# Altium footprint library Library_PCB.PcbLib: 19 footprints (part 1 of 2)
Each footprint in its own frame and in the unit in brackets; x right, y up, seen from the top. Pads: shape width x height; smd on the part's side, far side on the other; paste and mask are expansions set on the pad; w line width, h text height; cw(c..) or ccw(c..) is an arc to the next point about the centre after c.
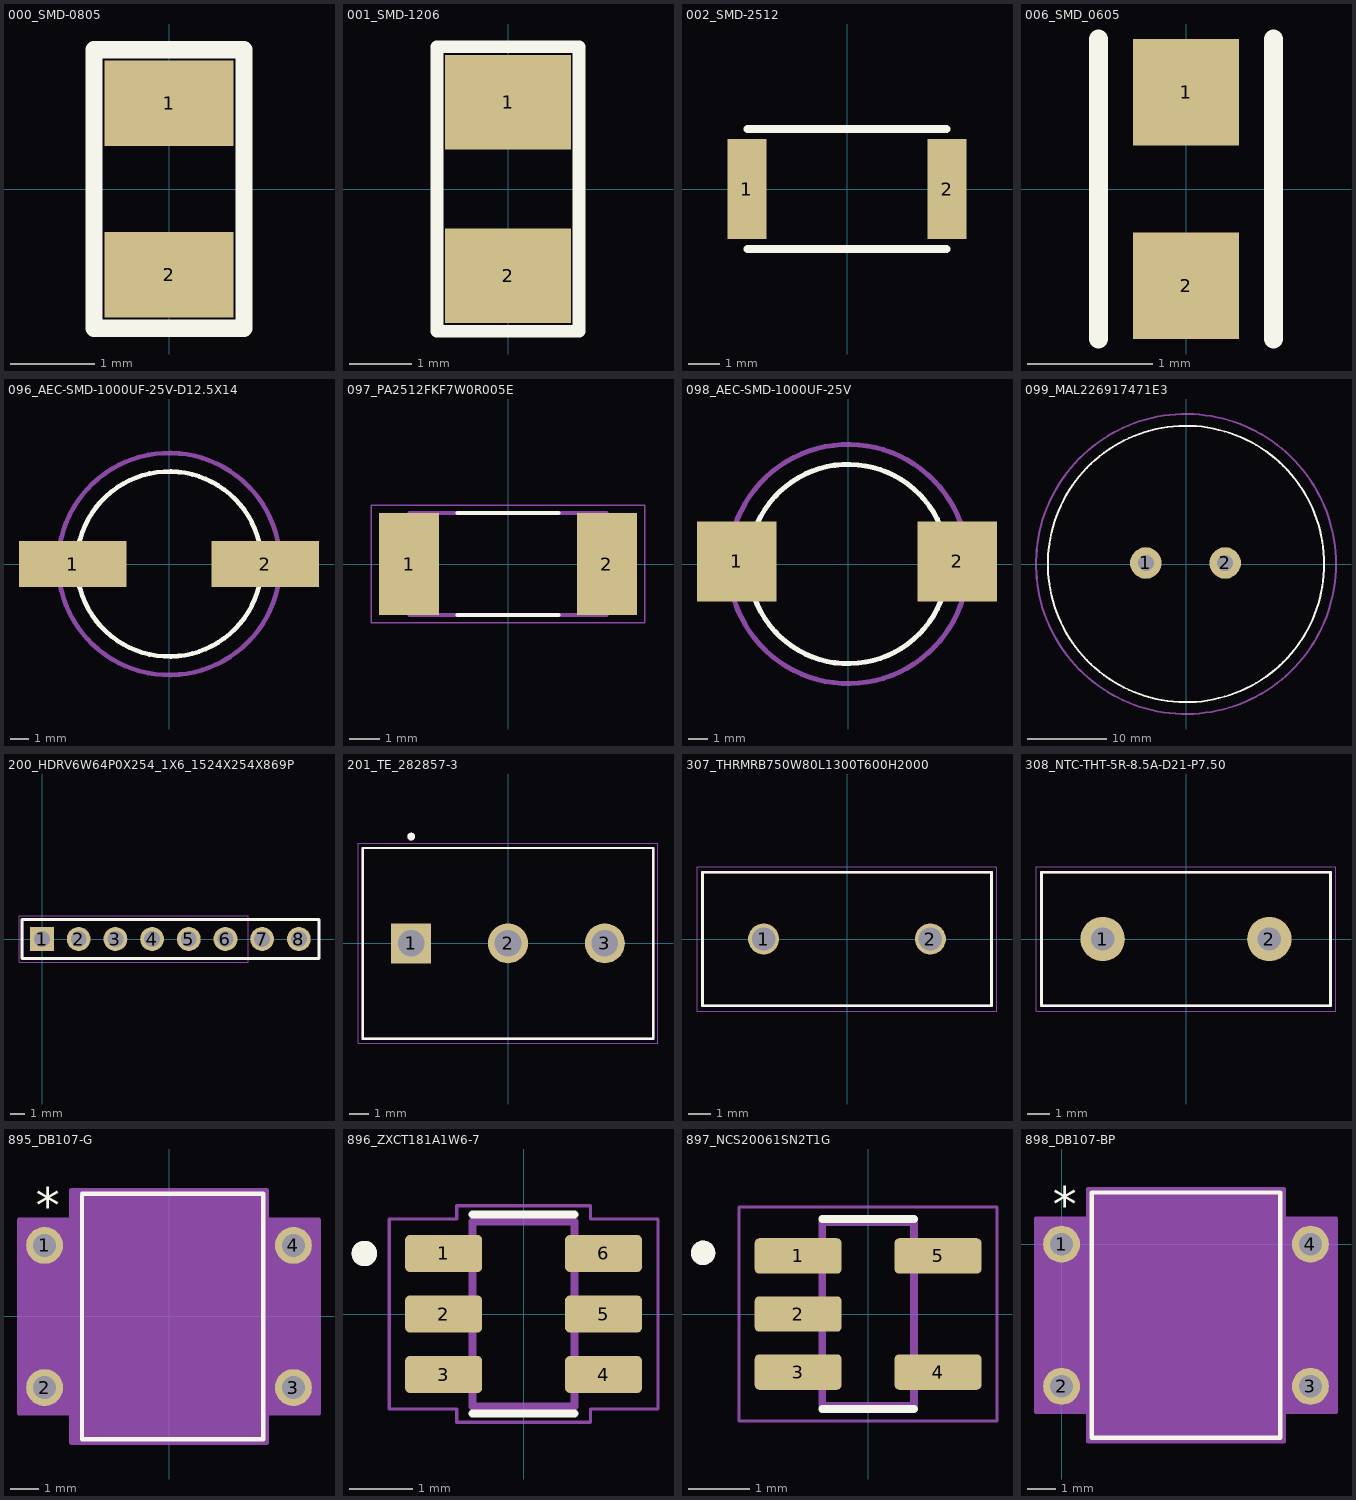
[diagram p0: the footprints below, top view; thin cyan lines are the x and y axes]

## 000_SMD-0805 [mil]
pads (2):
  rect 60x40 smd: 1(0,40) 2(0,-40)
Top Overlay:
  lines w8: -35,-65 35,-65 35,65 -35,65 -35,-65
3D body "SW3dPS-0805 SMD Resistor.STEP": height 30.79, standoff 0, extent -23.6,-39.36 25.6,39.38

## 001_SMD-1206 [mil]
pads (2):
  rect 80x60 smd: 1(0,55) 2(0,-55)
Top Overlay:
  lines w8: -45,-90 45,-90 45,90 -45,90 -45,-90
3D body "User Library-RES_3216-1206.step": height 33.46, standoff 0, extent -34.05,-65.94 34.06,65.95

## 002_SMD-2512 [mil]
pads (2):
  rect 49x125 smd: 1(-125.5,0) 2(125.5,0)
Top Overlay:
  lines w10: -125,-75 125,-75 ; -125,75 125,75
3D body "resistor 2512.step": height 63.07, standoff 0, extent -124.99,-59.05 125,59.06

## 006_SMD_0605 [mm]
pads (2):
  rect 0.85x0.85 smd: 1(0,0.775) 2(0,-0.775)
Top Overlay:
  lines w0.152: -0.7,-1.2 -0.7,1.2 ; 0.7,-1.2 0.7,1.2
3D body "0603.step": height 0.56, standoff 0, extent -0.4,-0.85 0.4,0.85

## 096_AEC-SMD-1000UF-25V-D12.5X14 [mm] "Polarized SMD aluminum electrolytic capacitor, 1000 µF, 25 V, Ø12.5 × 14 mm. Filters the auxiliary DC supply."
pads (2):
  rect 5.8x2.5 smd mask+0.12: 1(-5.207,0) 2(5.207,0)
Top Overlay:
  circle w0.254: c0.009,0 r5
Mechanical 15:
  circle w0.254: c0.009,0 r6
3D body: height 10, standoff 0, extent -4.991,-5 5.009,5

## 097_PA2512FKF7W0R005E [mm] "5 mΩ, 2 W, ±1% current-sense shunt resistor, 2512 (6332 metric) SMD package, low-resistance metal-element construction."
pads (2):
  rect 2x3.42 smd: 1(-3.302,0) 2(3.302,0)
Top Overlay:
  lines w0.127: -1.69,-1.7 1.69,-1.7 ; -1.69,1.7 1.69,1.7
Mechanical 13:
  lines w0.127: -3.3,-1.7 3.3,-1.7 3.3,1.7 -3.3,1.7 -3.3,-1.7
Mechanical 15:
  lines w0.05: -4.572,-1.958 4.572,-1.958 4.572,1.958 -4.572,1.958 -4.572,-1.958
3D body "step_temp.STEP": height 0.8, standoff 0, extent -3.2,-1.6 3.2,1.6

## 098_AEC-SMD-1000UF-25V [mm] "1000 µF, 25 V polarized aluminum electrolytic capacitor, SMD V-chip package, Ø10 mm body, approx. 10.5 mm height, 105 °C rated."
pads (2):
  rect 4x4 smd mask+0.12: 1(-5.588,0.127) 2(5.461,0.127)
Top Overlay:
  circle w0.254: c0,0 r5
Mechanical 15:
  circle w0.254: c0,0 r6
3D body: height 10, standoff 0, extent -5,-5 5,5

## 099_MAL226917471E3 [mm] "470 µF, 450 V polarized aluminum electrolytic capacitor, snap-in THT, Ø35 mm body, 10 mm lead spacing, 105 °C rated."
pads (2):
  round 4 hole 2 mask+0.05: 1(-5.08,0.127) 2(4.953,0.127)
Top Overlay:
  circle w0.254: c0,0 r17.5
Mechanical 15:
  circle w0.254: c0,0 r19
3D body: height 47, standoff 0, extent -17.5,-17.5 17.5,17.5

## 200_HDRV6W64P0X254_1X6_1524X254X869P [mm]
pads (8):
  rect 1.65x1.65 / inner round 1.65 / far side rect 1.65x1.65 hole 1.1: 1(0,0)
  round 1.65 hole 1.1: 2(2.54,0) 3(5.08,0) 4(7.62,0) 5(10.16,0) 6(12.7,0) 7(15.24,0) 8(17.78,0)
Top Overlay:
  lines w0.2: -1.397,-1.345 19.177,-1.345 19.177,1.345 -1.397,1.345 -1.397,-1.345
Mechanical 15:
  lines w0.1: -1.345,-1.345 19.177,-1.345 19.177,1.345 -1.345,1.345 -1.345,-1.345
Mechanical 20:
  lines w0.05: -1.595,-1.595 14.295,-1.595 14.295,1.595 -1.595,1.595 -1.595,-1.595
3D body "6130xx11121-6Pin.stp": height 8.69, standoff -3.2, extent 3.81,-1.27 19.05,1.27
3D body "6130xx11121-6Pin.stp": height 8.69, standoff -3.2, extent -1.27,-1.27 13.97,1.27

## 201_TE_282857-3 [mm]
pads (3):
  rect 2.1x2.1 / inner round 2.1 / far side rect 2.1x2.1 hole 1.4: 1(-5.08,0)
  round 2.1 hole 1.4: 2(0,0) 3(5.08,0)
Top Overlay:
  circle w0.2: c-5.08,5.6 r0.1
  lines w0.127: -7.62,-5 7.62,-5 7.62,5 -7.62,5 -7.62,-5
Mechanical 13:
  circle w0.2: c-5.08,5.6 r0.1
  lines w0.127: -7.62,-5 7.62,-5 7.62,5 -7.62,5 -7.62,-5
Mechanical 15:
  lines w0.05: -7.87,-5.25 7.87,-5.25 7.87,5.25 -7.87,5.25 -7.87,-5.25
3D body "step_temp.STEP": height 20, standoff -2.5, extent -8.12,-4.873 7.62,5.127

## 307_THRMRB750W80L1300T600H2000 [mm]
pads (2):
  round 1.4 hole 1.05: 1(-3.75,0) 2(3.75,0)
Top Overlay:
  lines w0.127: -6.5,-3 -6.5,3 6.5,3 6.5,-3 -6.5,-3
Mechanical 13:
  lines w0.127: -6.5,-3 6.5,-3 6.5,3 -6.5,3 -6.5,-3
Mechanical 15:
  lines w0.05: -6.75,-3.25 6.75,-3.25 6.75,3.25 -6.75,3.25 -6.75,-3.25

## 308_NTC-THT-5R-8.5A-D21-P7.50 [mm] "Through-hole NTC inrush current limiter, 5 Ω at 25 °C, 8.5 A, Ø21 mm disc, 7.50 mm lead pitch. Limits the DC-link capacitor charging current at power-up."
pads (2):
  round 2 hole 1.05: 1(-3.75,0) 2(3.75,0)
Top Overlay:
  lines w0.127: -6.5,-3 6.5,-3 6.5,3 -6.5,3 -6.5,-3
Mechanical 13:
  lines w0.127: -6.5,-3 -6.5,3 6.5,3 6.5,-3 -6.5,-3
Mechanical 15:
  lines w0.05: -6.75,-3.25 -6.75,3.25 6.75,3.25 6.75,-3.25 -6.75,-3.25

## 895_DB107-G [mil] "Single-phase bridge rectifier, 1 A, 1000 V, 4-pin through-hole DB package. Rectifies the auxiliary transformer output."
pads (4):
  round 52 hole 32 paste-99999 mask+0: 1(-175,100) 2(-175,-100) 3(175,-100) 4(175,100)
Top Overlay:
  lines w6: -122.5,170.02 -122.5,-172.5 131.44,-172.5 ; -122.5,172.5 131.44,172.5 ; 132.5,-172.5 132.5,172.5
  text "*" at -187.5,131 h50
Mechanical 13:
  lines w1: -127.5,-167.5 127.5,-167.5 127.5,167.5 -127.5,167.5 ; -117.5,-162.5 -117.5,172.5 ; -2,172.5 ccw(c10,172.5) 22,172.5 ; -191,-116 -127.5,-116 -127.5,-84 -191,-84 -191,-116 ; -191,84 -127.5,84 -127.5,116 -191,116 -191,84 ; 127.5,-116 191,-116 191,-84 127.5,-84 127.5,-116 ; 127.5,84 191,84 191,116 127.5,116 127.5,84
  text "*" at -130,75 h50
Mechanical 15:
  region: 137.5,-136 211,-136 211,136 137.5,136 137.5,177.5 -137.5,177.5 -137.5,136 -211,136 -211,-136 -137.5,-136 -137.5,-177.5 137.5,-177.5
  lines w6: -211,-136 -137.5,-136 -137.5,-177.5 137.5,-177.5 137.5,-136 211,-136 211,136 137.5,136 137.5,177.5 -137.5,177.5 -137.5,136 -211,136 -211,-136
3D body "DB-1_MCC.step": height 195.12, standoff -100, extent -185,-169.96 185,165

## 896_ZXCT181A1W6-7 [mm] "Bidirectional high-side current-sense amplifier, fixed gain 20 V/V, 2.7–5.5 V supply, up to 26 V common-mode input range, SOT-26 package."
pads (6):
  rrect25% 1.21x0.58 smd: 1(-1.255,0.95) 2(-1.255,0) 3(-1.255,-0.95) 4(1.255,-0.95) 5(1.255,0) 6(1.255,0.95)
Top Overlay:
  circle w0.2: c-2.5,0.95 r0.1
  lines w0.127: -0.8,-1.56 0.8,-1.56 ; -0.8,1.56 0.8,1.56
Mechanical 13:
  circle w0.2: c-2.5,0.95 r0.1
  lines w0.127: -0.8,-1.45 0.8,-1.45 0.8,1.45 -0.8,1.45 -0.8,-1.45
Mechanical 15:
  lines w0.05: -2.11,-1.49 -1.05,-1.49 -1.05,-1.7 1.05,-1.7 1.05,-1.49 2.11,-1.49 2.11,1.49 1.05,1.49 1.05,1.7 -1.05,1.7 -1.05,1.49 -2.11,1.49 -2.11,-1.49
3D body "step_temp.STEP": height 1.45, standoff 0, extent -1.4,-1.45 1.4,1.45

## 897_NCS20061SN2T1G [mm]
pads (5):
  rrect25% 1.42x0.58 smd: 1(-1.145,0.95) 2(-1.145,0) 3(-1.145,-0.95) 4(1.145,-0.95) 5(1.145,0.95)
Top Overlay:
  circle w0.2: c-2.7,1 r0.1
  lines w0.127: -0.75,-1.553 0.75,-1.553 ; -0.75,1.553 0.75,1.553
Mechanical 13:
  circle w0.2: c-2.7,1 r0.1
  lines w0.127: -0.75,-1.5 0.75,-1.5 0.75,1.5 -0.75,1.5 -0.75,-1.5
Mechanical 15:
  lines w0.05: -2.11,-1.75 2.11,-1.75 2.11,1.75 -2.11,1.75 -2.11,-1.75
3D body "step_temp.STEP": height 1.1, standoff 0, extent -1.375,-1.5 1.375,1.5

## 898_DB107-BP [mil]
pads (4):
  round 52 hole 32 paste-99999 mask+0: 1(0,0) 2(0,-200) 3(350,-200) 4(350,0)
Top Overlay:
  lines w6: 42.5,-272.5 42.5,72.5 307.5,72.5 307.5,-272.5 42.5,-272.5
  text "*" at -12.5,31 h50
Mechanical 13:
  lines w1: 163,67.5 ccw(c175,67.5) 187,67.5 ; -16,-216 47.5,-216 47.5,-184 -16,-184 -16,-216 ; -16,-16 47.5,-16 47.5,16 -16,16 -16,-16 ; 47.5,-267.5 47.5,67.5 302.5,67.5 302.5,-267.5 47.5,-267.5 ; 302.5,-216 366,-216 366,-184 302.5,-184 302.5,-216 ; 302.5,-16 366,-16 366,16 302.5,16 302.5,-16
  text "*" at 45,-25 h50
Mechanical 15:
  region: 312.5,-236 386,-236 386,36 312.5,36 312.5,77.5 37.5,77.5 37.5,36 -36,36 -36,-236 37.5,-236 37.5,-277.5 312.5,-277.5
  lines w6: -36,-236 37.5,-236 37.5,-277.5 312.5,-277.5 312.5,-236 386,-236 386,36 312.5,36 312.5,77.5 37.5,77.5 37.5,36 -36,36 -36,-236
3D body "DB-1_MCC.step": height 195.12, standoff -100, extent -10,-269.96 360,65